# Altium footprint library Connectors.PcbLib: 228 footprints (part 5 of 15)
Each footprint in its own frame and in the unit in brackets; x right, y up, seen from the top. Pads: shape width x height; smd on the part's side, far side on the other; paste and mask are expansions set on the pad; w line width, h text height; cw(c..) or ccw(c..) is an arc to the next point about the centre after c.
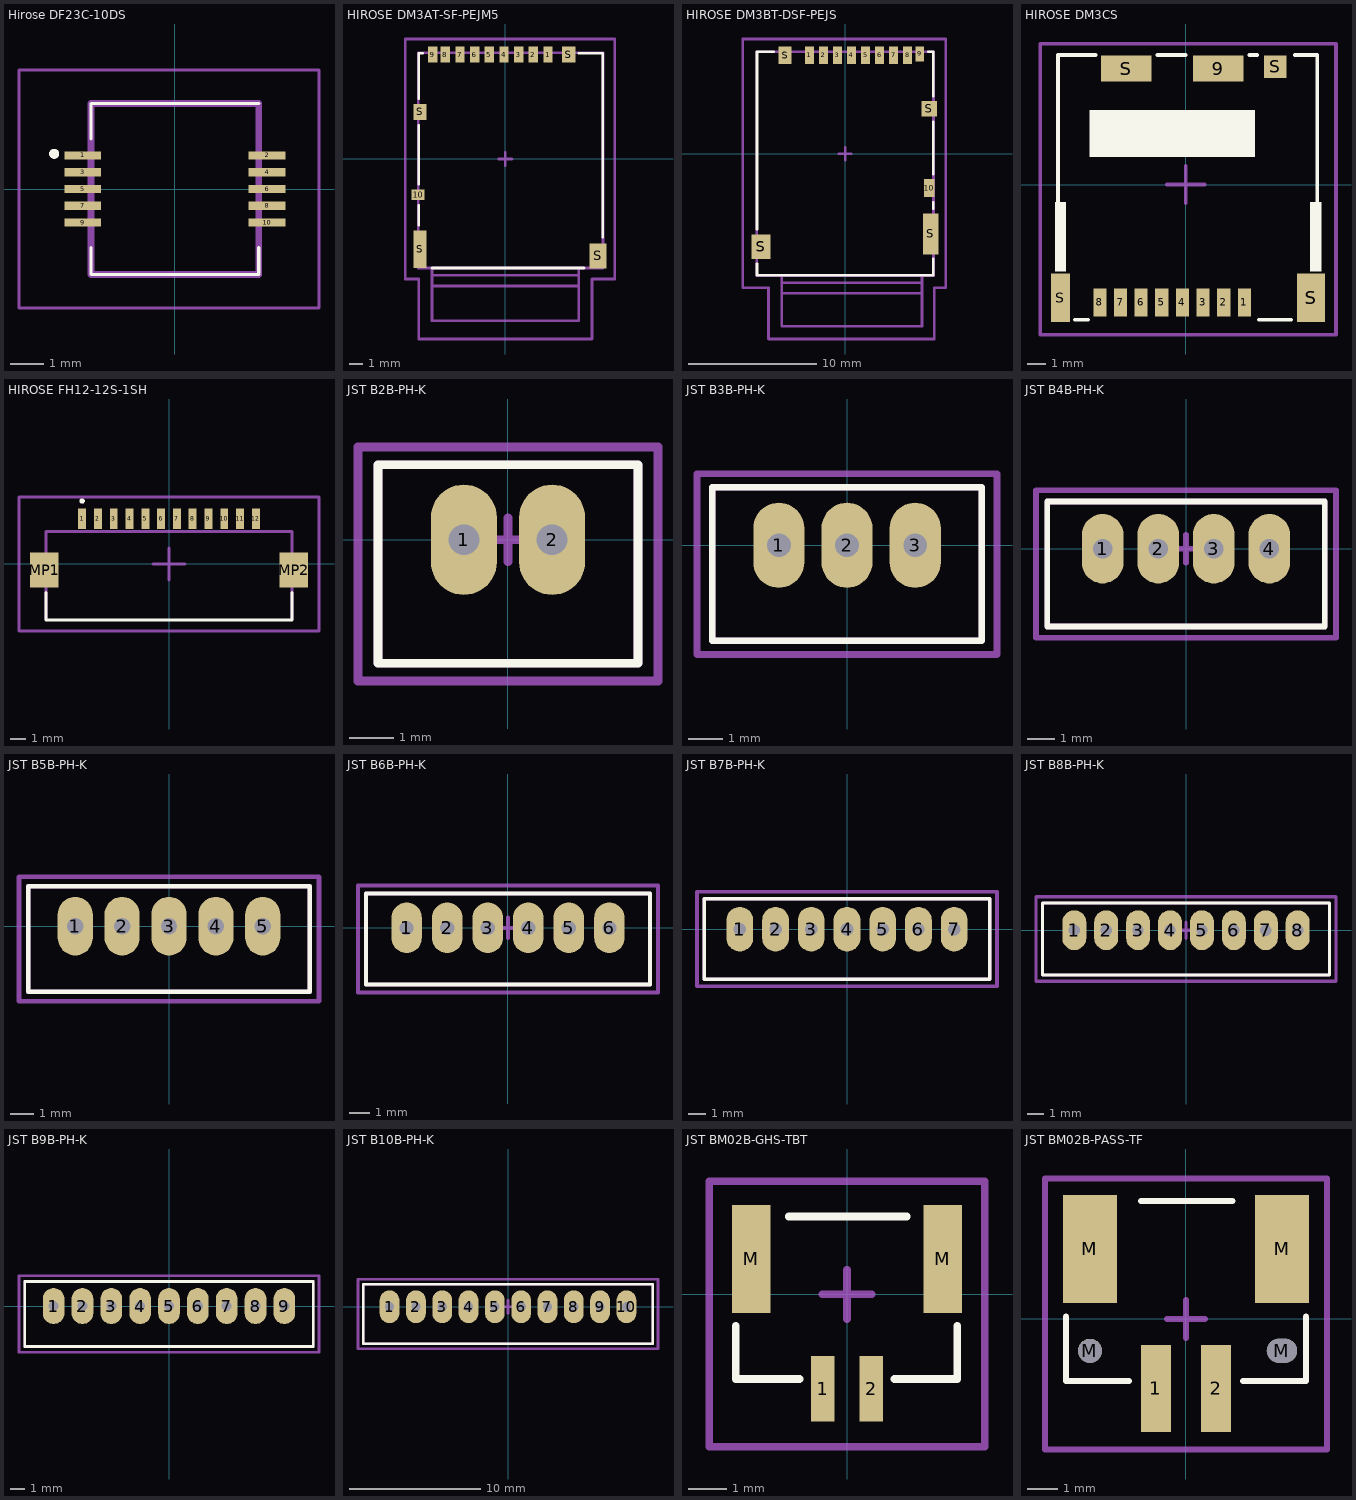
[diagram p4: the footprints below, top view; thin cyan lines are the x and y axes]

## Hirose DF23C-10DS [mm] "0.5mm Pitch Low-Profile Board-to-Board/Board-to-FPC Connectors"
height 1.5
pads (10):
  rect 1.1x0.25 smd: 1(-2.75,1) 2(2.75,1) 3(-2.75,0.5) 4(2.75,0.5) 5(-2.75,0) 6(2.75,0) 7(-2.75,-0.5) 8(2.75,-0.5) 9(-2.75,-1) 10(2.75,-1)
Top Overlay:
  lines w0.1: -2.5,-2.55 2.5,-2.55 -2.5,-2.55 ; -2.5,-2.55 -2.5,-1.75 -2.5,-2.55 ; -2.5,2.55 2.5,2.55 -2.5,2.55 ; -2.5,2.55 -2.5,1.5 -2.5,2.55 ; 2.5,-2.5 2.5,-1.75 2.5,-2.5
  lines w0.2: -3.6,1 cw(c-3.6,1.05) -3.6,1.1 ; -3.6,1 ccw(c-3.6,1.05) -3.6,1.1 ; -3.6,1 cw(c-3.6,1.05) -3.6,1.1
Top Component Outline:
  lines w0.2: -2.5,-2.55 2.5,-2.55 2.5,2.55 -2.5,2.55 -2.5,-2.55
Top Courtyard:
  lines w0.1: -4.65,-3.55 -4.65,3.55 4.3,3.55 4.3,-3.55 -4.65,-3.55
3D body "HIROSE DF23C-10DS-0.5V.stp": height 1.4, standoff -0.05, extent -2.975,-2.55 3.025,2.55

## HIROSE DM3AT-SF-PEJM5 [mm]
height 1.68
pads (14):
  rect 0.7x1.2 smd: 1(3.2,7.825) 2(2.1,7.825) 3(1,7.825) 4(-0.1,7.825) 5(-1.2,7.825) 6(-2.3,7.825) 7(-3.4,7.825) 8(-4.5,7.825) 9(-5.45,7.825)
  rect 1x0.8 smd: 10(-6.55,-2.675)
  rect 1x2.8 smd: S(-6.4,-6.775)
  rect 1x1.2 smd: S(-6.4,3.525) S(4.75,7.825)
  rect 1.3x1.9 smd: S(6.95,-7.275)
Top Overlay:
  lines w0.2: -6.5,-4.975 -6.5,-3.475 ; -6.5,-1.875 -6.5,2.525 ; -6.5,4.525 -6.5,7.925 -6.2,7.925 ; -5.5,-8.175 5.9,-8.175 ; 5.5,7.925 7.3,7.925 7.3,-5.875
Top Component Outline:
  lines w0.2: -5.5,-8.725 5.5,-8.725 ; -5.5,-8.175 -5.5,-9.525 ; 5.5,-8.175 5.5,-9.525 ; -5.5,-9.525 -5.5,-12.125 5.5,-12.125 5.5,-9.525 ; -5.5,-9.525 5.5,-9.525 ; -6.525,-8.175 -6.525,7.975 7.325,7.975 7.325,-8.175 -6.525,-8.175
Top Courtyard:
  lines w0.2: -0.5,0 0.5,0 ; 0,-0.5 0,0.5 ; -7.5,-9 -6.5,-9 -6.5,-13.5 6.5,-13.5 6.5,-9 8.2,-9 8.2,-8 8.2,9 -7.5,9 -7.5,-8.5 -7.5,-9
3D body "Hirose DM3AT-SF-PEJM5.STEP": height 1.68, standoff 0, extent -6.525,-8.175 7.325,7.975

## HIROSE DM3BT-DSF-PEJS [mm]
height 2.38
pads (14):
  rect 0.7x1.4 smd: 1(-2.8,7.725) 2(-1.7,7.725) 3(-0.6,7.725) 4(0.5,7.725) 5(1.6,7.725) 6(2.7,7.725) 7(3.8,7.725) 8(4.9,7.725)
  rect 0.7x1.2 smd: 9(5.85,7.825)
  rect 0.8x1.4 smd: 10(6.6,-2.675)
  rect 1.5x1.9 smd: S(-6.6,-7.275)
  rect 1x1.4 smd: S(-4.7,7.725)
  rect 1.2x1.2 smd: S(6.6,3.525)
  rect 1.2x3.2 smd: S(6.7,-6.275)
Top Overlay:
  lines w0.2: -6.9,-8.6 -6.9,-9.5 6.9,-9.5 6.9,-8.2 ; -6.9,-5.9 -6.9,8 -5.6,8 ; 6.5,8 6.9,8 6.9,4.5 ; 6.9,-4.3 6.9,-3.8 ; 6.9,-1.6 6.9,2.5
Top Component Outline:
  lines w0.2: -4.975,-10.1 6.025,-10.1 ; -4.975,-9.55 -4.975,-10.9 ; 6.025,-9.55 6.025,-10.9 ; -4.975,-10.9 6.025,-10.9 ; -4.975,-10.9 -4.975,-13.5 6.025,-13.5 6.025,-10.9 ; -6.925,-9.55 6.925,-9.55 6.925,8 -6.925,8 -6.925,-9.55
Top Courtyard:
  lines w0.2: -0.5,0 0.5,0 ; 0,-0.5 0,0.5 ; -8,-10.5 -6,-10.5 -6,-14.5 7,-14.5 7,-10.5 7.9,-10.5 7.9,9 -8,9 -8,-10.5
3D body "Hirose DM3BT-DSF-PEJS.STEP": height 1.83, standoff 0, extent -6.925,-9.55 6.925,8

## HIROSE DM3CS [mm]
height 1.83
pads (13):
  rect 0.7x1.5 smd: 1(3.125,-6.275) 2(2.025,-6.275) 3(0.925,-6.275) 4(-0.175,-6.275) 5(-1.275,-6.275) 6(-2.375,-6.275) 7(-3.475,-6.275) 8(-4.575,-6.275)
  rect 2.7x1.4 smd: 9(1.725,6.175) S(-3.175,6.175)
  rect 1x2.6 smd: S(-6.675,-6.025)
  rect 1.2x1.2 smd: S(4.775,6.275)
  rect 1.5x2.6 smd: S(6.675,-6.025)
Top Overlay:
  rectangle: -5.125,1.475 3.675,3.975
  rectangle: -6.975,-4.625 -6.375,-0.925
  rectangle: 6.625,-4.625 7.225,-0.925
  lines w0.2: -6.7,-4.4 -6.8,-4.3 -6.8,6.9 -4.8,6.9 ; -5.9,-7.2 -5.2,-7.2 ; -1.5,6.9 0,6.9 ; 3.4,6.9 3.8,6.9 ; 3.9,-7.2 5.6,-7.2 ; 5.8,6.9 7,6.9 7,-4.4
Top Courtyard:
  lines w0.2: -1,0 1,0 ; 0,-1 0,1 ; -7.75,-8 8,-8 8,7.5 -7.75,7.5 -7.75,-8
3D body "Hirose DM3CS-SF.STEP": height 1.93, standoff 0, extent -6.8,-7.2 7,6.9

## HIROSE FH12-12S-1SH [mm]
pads (14):
  rect 0.5x1.3 smd: 1(-5.5,2.863) 2(-4.5,2.863) 3(-3.5,2.863) 4(-2.5,2.863) 5(-1.5,2.863) 6(-0.5,2.863) 7(0.5,2.863) 8(1.5,2.863) 9(2.5,2.863) 10(3.5,2.863) 11(4.5,2.863) 12(5.5,2.863)
  rect 1.8x2.2 smd: MP1(-7.9,-0.387) MP2(7.9,-0.387)
Top Overlay:
  circle w0.2: c-5.5,3.987 r0.07
  lines w0.2: -7.8,-1.82 -7.8,-3.537 7.8,-3.537 7.8,-1.82
Top Component Outline:
  lines w0.2: -7.8,-3.537 -7.8,2.063 7.8,2.063 7.8,-3.537
Top Courtyard:
  lines w0.2: -1,0 1,0 ; 0,-1 0,1 ; -9.5,-4.237 -9.5,4.237 9.5,4.237 9.5,-4.237 -9.5,-4.237
3D body "HIROSE FPC-FFC FH12-12S-1SH.stp": height 2.04, standoff -0.06, extent -8.3,-3.337 8.3,3.063

## JST B2B-PH-K [mm]
height 6
pads (2):
  oval 1.5x2.5 hole 0.7: 1(-1,0) 2(1,0)
Top Overlay:
  lines w0.2: -2.95,-2.8 -2.95,1.7 2.95,1.7 2.95,-2.8 -2.95,-2.8
Bottom Overlay:
  circle w0.254: c-2.1,1.1 r0.141
Top Component Outline:
  lines w0.2: -2.95,-2.8 2.95,-2.8 2.95,1.7 -2.95,1.7 -2.95,-2.8
Top Courtyard:
  lines w0.2: -0.5,0 0.5,0 ; 0,-0.5 0,0.5 ; -3.4,-3.2 3.4,-3.2 3.4,2.1 -3.4,2.1 -3.4,-3.2
3D body "JST B2B-PH-K-S.STEP": height 6, standoff -3.4, extent -2.95,-2.8 2.95,1.7

## JST B3B-PH-K [mm]
height 6
pads (3):
  oval 1.5x2.5 hole 0.7: 1(-2,0) 2(0,0) 3(2,0)
Top Overlay:
  lines w0.2: -3.95,-2.8 3.95,-2.8 3.95,1.7 -3.95,1.7 -3.95,-2.8
Bottom Overlay:
  circle w0.254: c-3.1,1.1 r0.141
Top Component Outline:
  lines w0.2: -3.95,-2.8 -3.95,1.7 3.95,1.7 3.95,-2.8 -3.95,-2.8
Top Courtyard:
  lines w0.2: -0.5,0 0.5,0 ; 0,-0.5 0,0.5 ; -4.4,-3.2 -4.4,2.1 4.4,2.1 4.4,-3.2 -4.4,-3.2
3D body "JST B3B-PH-K-S.STEP": height 6, standoff -3.4, extent -3.95,-2.8 3.95,1.7

## JST B4B-PH-K [mm]
height 6
pads (4):
  oval 1.5x2.5 hole 0.7: 1(-3,0) 2(-1,0) 3(1,0) 4(3,0)
Top Overlay:
  lines w0.2: -5,-2.8 5,-2.8 5,1.7 -5,1.7 -5,-2.8
Bottom Overlay:
  circle w0.254: c-4.1,1.1 r0.141
Top Component Outline:
  lines w0.2: -5,-2.8 -5,1.7 5,1.7 5,-2.8 -5,-2.8
Top Courtyard:
  lines w0.2: -0.5,0 0.5,0 ; 0,-0.5 0,0.5 ; -5.4,-3.2 -5.4,2.1 5.4,2.1 5.4,-3.2 -5.4,-3.2
3D body "JST B4B-PH-K-S.STEP": height 6, standoff -3.4, extent -4.95,-2.8 4.95,1.7

## JST B5B-PH-K [mm]
height 6
pads (5):
  oval 1.5x2.5 hole 0.7: 1(-4,0) 2(-2,0) 3(0,0) 4(2,0) 5(4,0)
Top Overlay:
  lines w0.2: -6,-2.8 -6,1.7 6,1.7 6,-2.8 -6,-2.8
Bottom Overlay:
  circle w0.254: c-5.1,1.1 r0.141
Top Component Outline:
  lines w0.2: -6,-2.8 6,-2.8 6,1.7 -6,1.7 -6,-2.8
Top Courtyard:
  lines w0.2: -0.5,0 0.5,0 ; 0,-0.5 0,0.5 ; -6.4,-3.2 6.4,-3.2 6.4,2.1 -6.4,2.1 -6.4,-3.2
3D body "JST B5B-PH-K-S.STEP": height 6, standoff -3.4, extent -5.95,-2.8 5.95,1.7

## JST B6B-PH-K [mm]
height 6
pads (6):
  oval 1.5x2.5 hole 0.7: 1(-5,0) 2(-3,0) 3(-1,0) 4(1,0) 5(3,0) 6(5,0)
Top Overlay:
  lines w0.2: -7,-2.8 -7,1.7 7,1.7 7,-2.8 -7,-2.8
Bottom Overlay:
  circle w0.254: c-6.1,1.1 r0.141
Top Component Outline:
  lines w0.2: 6.95,-2.8 -7,-2.8 -7,1.7 7,1.7 7,-2.8
Top Courtyard:
  lines w0.2: -0.5,0 0.5,0 ; 0,-0.5 0,0.5 ; -7.4,-3.2 7.4,-3.2 7.4,2.1 -7.4,2.1 -7.4,-3.2
3D body "JST B6B-PH-K-S.STEP": height 6, standoff -3.4, extent -6.95,-2.8 6.95,1.7

## JST B7B-PH-K [mm]
height 6
pads (7):
  oval 1.5x2.5 hole 0.7: 1(-6,0) 2(-4,0) 3(-2,0) 4(0,0) 5(2,0) 6(4,0) 7(6,0)
Top Overlay:
  lines w0.2: -8,-2.8 -8,1.7 8,1.7 8,-2.8 -8,-2.8
Bottom Overlay:
  circle w0.254: c-7.1,1.1 r0.141
Top Component Outline:
  lines w0.2: -8,-2.8 8,-2.8 8,1.7 -8,1.7 -8,-2.8
Top Courtyard:
  lines w0.2: -0.5,0 0.5,0 ; 0,-0.5 0,0.5 ; -8.4,-3.2 8.4,-3.2 8.4,2.1 -8.4,2.1 -8.4,-3.2
3D body "JST B7B-PH-K-S.STEP": height 6, standoff -3.4, extent -7.95,-2.8 7.95,1.7

## JST B8B-PH-K [mm]
height 6
pads (8):
  oval 1.5x2.5 hole 0.7: 1(-7,0) 2(-5,0) 3(-3,0) 4(-1,0) 5(1,0) 6(3,0) 7(5,0) 8(7,0)
Top Overlay:
  lines w0.2: -9,-2.8 9,-2.8 9,1.7 -9,1.7 -9,-2.8
Bottom Overlay:
  circle w0.254: c-8.1,1.1 r0.141
Top Component Outline:
  lines w0.2: 8.95,1.7 -9,1.7 -9,-2.8 9,-2.8 9,1.7
Top Courtyard:
  lines w0.2: -0.5,0 0.5,0 ; 0,-0.5 0,0.5 ; -9.4,-3.2 -9.4,2.1 9.4,2.1 9.4,-3.2 -9.4,-3.2
3D body "JST B8B-PH-K-S.STEP": height 6, standoff -3.4, extent -8.95,-2.8 8.95,1.7

## JST B9B-PH-K [mm]
height 6
pads (9):
  oval 1.5x2.5 hole 0.7: 1(-8,0) 2(-6,0) 3(-4,0) 4(-2,0) 5(0,0) 6(2,0) 7(4,0) 8(6,0) 9(8,0)
Top Overlay:
  lines w0.2: -10,-2.8 -10,1.7 10,1.7 10,-2.8 -10,-2.8
Bottom Overlay:
  circle w0.254: c-9.1,1.1 r0.141
Top Component Outline:
  lines w0.2: -10,-2.8 10,-2.8 10,1.7 -10,1.7 -10,-2.8
Top Courtyard:
  lines w0.2: -0.5,0 0.5,0 ; 0,-0.5 0,0.5 ; -10.4,-3.2 10.4,-3.2 10.4,2.1 -10.4,2.1 -10.4,-3.2
3D body "JST B9B-PH-K-S.STEP": height 6, standoff -3.4, extent -9.95,-2.8 9.95,1.7

## JST B10B-PH-K [mm]
height 6
pads (10):
  oval 1.5x2.5 hole 0.7: 1(-9,0) 2(-7,0) 3(-5,0) 4(-3,0) 5(-1,0) 6(1,0) 7(3,0) 8(5,0) 9(7,0) 10(9,0)
Top Overlay:
  lines w0.2: -11,-2.8 11,-2.8 11,1.7 -11,1.7 -11,-2.8
Bottom Overlay:
  circle w0.254: c-10.1,1.1 r0.141
Top Component Outline:
  lines w0.2: 10.95,-2.8 -11,-2.8 -11,1.7 11,1.7 11,-2.8
Top Courtyard:
  lines w0.2: -0.5,0 0.5,0 ; 0,-0.5 0,0.5 ; -11.4,-3.2 -11.4,2.1 11.4,2.1 11.4,-3.2 -11.4,-3.2
3D body "JST B10B-PH-K-S.STEP": height 6, standoff -3.4, extent -10.95,-2.8 10.95,1.7

## JST BM02B-GHS-TBT [mm] "JST GH Series 1.25mm pitch, 4 pin top entry connector"
height 4.5
pads (4):
  rect 0.6x1.7 smd: 1(-0.625,-2.437) 2(0.625,-2.437)
  rect 1x2.8 smd: M(-2.475,0.913) M(2.475,0.913)
Top Overlay:
  lines w0.2: -2.875,-0.812 -2.875,-2.187 -1.225,-2.187 ; -1.504,2.008 1.544,2.008 ; 1.225,-2.187 2.85,-2.187 2.85,-0.812
Top Courtyard:
  lines w0.2: -0.635,0 0.635,0 ; 0,-0.635 0,0.635 ; -3.556,-3.937 -3.556,2.921 3.556,2.921 3.556,-3.937 -3.556,-3.937
3D body "JST BM02B-GHS-TBT.STEP": height 4.18, standoff -0.03, extent -2.875,-2.987 2.875,1.963

## JST BM02B-PASS-TF [mm] "JST PA Series 2mm pitch, top entry connector"
height 11.1
pads (6):
  rect 1x2.9 smd: 1(-1,-2.325) 2(1,-2.325)
  round 0.8 hole 0.8 unplated mask+0.102: M(-3.2,-1.075)
  rect 1.8x3.6 smd: M(-3.2,2.325) M(3.2,2.325)
  oval 1x0.8 hole 0.8 slot 1 at 0 deg unplated mask+0.102: M(3.2,-1.075)
Top Overlay:
  lines w0.2: -4,0.075 -4,-2.075 -1.905,-2.075 ; -1.504,3.92 1.544,3.92 ; 1.905,-2.075 4,-2.075 4,0.075
Top Courtyard:
  lines w0.2: -0.635,-0.015 0.635,-0.015 ; 0,-0.65 0,0.62 ; -4.699,-4.357 4.699,-4.357 4.699,4.66 -4.699,4.66 -4.699,-4.357
3D body "JST BM02B-PASS-TF.STEP": height 9, standoff 0, extent -4,-3.225 4,3.875